# Altium footprint library KhPcbLib1.PcbLib: 10 footprints
Each footprint in its own frame and in the unit in brackets; x right, y up, seen from the top. Pads: shape width x height; smd on the part's side, far side on the other; paste and mask are expansions set on the pad; w line width, h text height; cw(c..) or ccw(c..) is an arc to the next point about the centre after c.
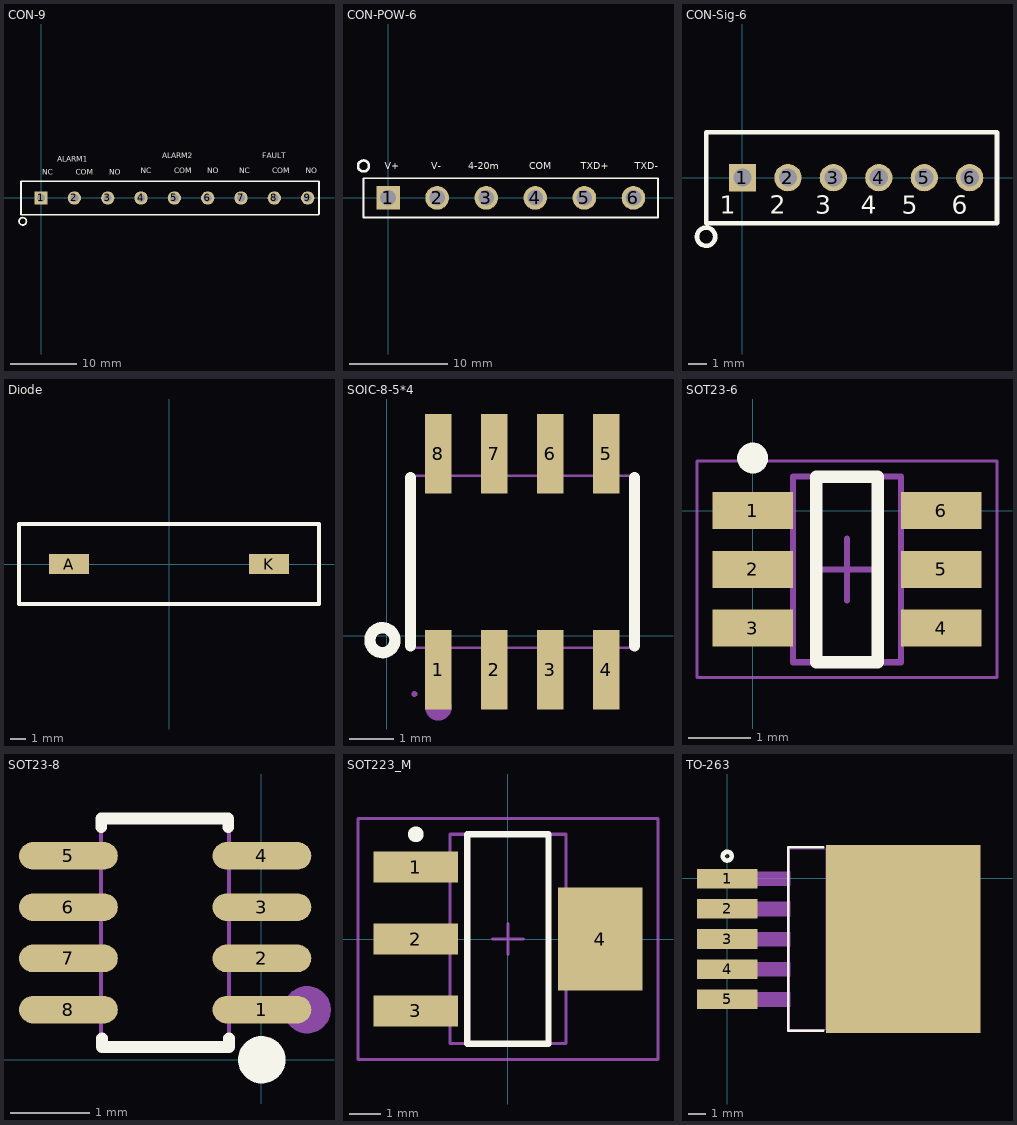
[diagram p0: the footprints below, top view; thin cyan lines are the x and y axes]

## CON-9 [mm]
pads (9):
  rect 2x2 hole 1.2: 1(0,0)
  round 2 hole 1.2: 2(5,0) 3(10,0) 4(15,0) 5(20,0) 6(25,0) 7(30,0) 8(35,0) 9(40,0)
Top Overlay:
  circle w0.254: c-2.75,-3.5 r0.559
  lines w0.254: -3,0 -3,2.5 41.7,2.5 41.7,-2.4 41.6,-2.5 -3,-2.5 -3,0.4
  text "FAULT" at 33.2,5.95 h0.8
  text "ALARM2" at 18.2,5.95 h0.8
  text "ALARM1" at 2.45,5.45 h0.8
  text "NC" at 0.2,3.45 h0.8
  text "COM" at 5.2,3.45 h0.8
  text "NO" at 10.2,3.45 h0.8
  text "NC" at 14.95,3.7 h0.8
  text "COM" at 19.95,3.7 h0.8
  text "NO" at 24.95,3.7 h0.8
  text "NC" at 29.7,3.7 h0.8
  text "COM" at 34.7,3.7 h0.8
  text "NO" at 39.7,3.7 h0.8

## CON-POW-6 [mm]
pads (6):
  rect 2.4x2.4 hole 1.6: 1(0,0)
  round 2.4 hole 1.6: 2(5,0) 3(10,0) 4(15,0) 5(20,0) 6(25,0)
Top Overlay:
  circle w0.254: c-2.5,3.25 r0.559
  lines w0.2: -2.5,-2 -2.5,2 27.5,2 27.5,-2 -2.5,-2
  text "TXD-" at 25.154,2.904 h0.7
  text "COM" at 14.404,2.904 h0.7
  text "TXD+" at 19.654,2.904 h0.7
  text "4-20m" at 8.154,2.904 h0.7
  text "V-" at 4.404,2.904 h0.7
  text "V+" at -0.346,2.904 h0.7
Mechanical 13:
  lines w0.1: -2.5,-2 -2.5,2 27.5,2 27.5,-2

## CON-Sig-6 [mm]
pads (7):
  rect 1.5x1.5 hole 1: 1(0,0)
  round 1.5 hole 1: 2(2.5,0) 2(2.5,0) 3(5,0) 4(7.5,0) 5(10,0) 6(12.5,0)
Top Overlay:
  circle w0.254: c-2,-3.25 r0.5
  lines w0.254: -2,-2.5 -2,2.5 14,2.5 14,-2.5 -2,-2.5
  text "6" at 11.504,-1.996 h1
  text "5" at 8.754,-1.996 h1
  text "4" at 6.504,-1.996 h1
  text "3" at 4.004,-1.996 h1
  text "2" at 1.504,-1.996 h1
  text "1" at -1.246,-1.996 h1

## Diode [mm]
pads (2):
  rect 2.54x1.27 smd: A(-6.35,0) K(6.35,0)
Top Overlay:
  lines w0.254: -9.525,-2.54 9.525,-2.54 9.525,2.54 -9.525,2.54 -9.525,0 -9.525,-2.54

## SMD-0805 [mm]

## SOIC-8-5*4 [mm] "SOIC, 8-Leads, Body 4.90x3.85mm, Pitch 1.27mm, IPC Medium Density"
height 2.65
pads (8):
  rect 0.6x1.8 smd paste+0 mask+0.05: 1(1.173,-0.776) 2(2.443,-0.776) 3(3.713,-0.776) 4(4.983,-0.776) 5(4.983,4.124) 6(3.713,4.124) 7(2.443,4.124) 8(1.173,4.124)
Top Overlay:
  circle w0.254: c-0.097,-0.104 r0.284
  lines w0.254: 0.538,-0.231 0.538,3.579 ; 5.618,-0.231 5.618,3.579
Mechanical 2:
  circle w0.3: c1.173,-1.628 r0.15
Mechanical 6:
  lines w0.051: 0.628,-0.276 5.528,-0.276 5.528,3.624 0.628,3.624 0.628,-0.276
Mechanical 7:
  region: 0.964,3.614 0.964,3.846 1.382,3.846 1.382,3.614
  region: 4.774,3.614 4.774,3.846 5.192,3.846 5.192,3.614
  region: 3.504,3.614 3.504,3.846 3.922,3.846 3.922,3.614
  region: 2.234,3.614 2.234,3.846 2.652,3.846 2.652,3.614
  region: 4.774,-0.498 4.774,-0.266 5.192,-0.266 5.192,-0.498
  region: 3.504,-0.498 3.504,-0.266 3.922,-0.266 3.922,-0.498
  region: 2.234,-0.498 2.234,-0.266 2.652,-0.266 2.652,-0.498
  region: 0.964,-0.498 0.964,-0.266 1.382,-0.266 1.382,-0.498
Mechanical 8:
  region: 0.688,-1.326 0.688,-1.351 0.653,-1.386 0.603,-1.386 0.568,-1.351 0.568,-1.326 0.568,-1.301 0.603,-1.266 0.653,-1.266 0.688,-1.301
Mechanical 9:
  region: 0.964,3.836 0.964,4.674 1.382,4.674 1.382,3.836
  region: 4.774,3.836 4.774,4.674 5.192,4.674 5.192,3.836
  region: 3.504,3.836 3.504,4.674 3.922,4.674 3.922,3.836
  region: 2.234,3.836 2.234,4.674 2.652,4.674 2.652,3.836
  region: 4.774,-1.326 4.774,-0.488 5.192,-0.488 5.192,-1.326
  region: 3.504,-1.326 3.504,-0.488 3.922,-0.488 3.922,-1.326
  region: 2.234,-1.326 2.234,-0.488 2.652,-0.488 2.652,-1.326
  region: 0.964,-1.326 0.964,-0.488 1.382,-0.488 1.382,-1.326
3D body "SOIC-8.step": height 1.75, standoff 0, extent 0.649,-1.349 5.549,4.651

## SOT23-6 [mm] "SOT23, 6-Leads, Body 2.64x3.50mm, Pitch 0.95mm, IPC Medium Density"
height 1.1
pads (6):
  rect 1.3x0.6 smd: 1(0,0) 2(0,-0.95) 3(0,-1.9) 4(3.05,-1.9) 5(3.05,-0.95) 6(3.05,0)
Top Overlay:
  circle w0.25: c0,0.85 r0.125
  lines w0.2: 1.025,-2.45 2.025,-2.45 2.025,0.55 1.025,0.55 1.025,-2.45
Mechanical 13:
  lines w0.1: 0.65,-2.45 0.65,0.55 2.4,0.55 2.4,-2.45 0.65,-2.45
Mechanical 15:
  lines w0.05: -0.9,-2.7 -0.9,0.8 3.95,0.8 3.95,-2.7 -0.9,-2.7
  lines w0.1: 1.025,-0.95 2.025,-0.95 ; 1.525,-1.45 1.525,-0.45
3D body: height 1.1, standoff 0.05, extent 0.65,-2.45 2.4,0.55

## SOT23-8 [mm]
pads (8):
  oval 1.252x0.35 smd: 1(0.005,0.632) 2(0.005,1.282) 3(0.005,1.932) 4(0.005,2.582) 5(-2.447,2.582) 6(-2.447,1.932) 7(-2.447,1.282) 8(-2.447,0.632)
Top Overlay:
  circle w0.3: c0.005,-0.002 r0.15
  lines w0.15: -2.031,2.943 -2.031,3.057 -0.421,3.057 -0.421,2.943 ; -2.021,0.271 -2.021,0.157 -0.411,0.157 -0.411,0.271
Mechanical 2:
  circle w0.3: c0.579,0.632 r0.15
Mechanical 6:
  lines w0.051: -2.034,0.157 -0.409,0.157 -0.409,3.057 -2.034,3.057 -2.034,0.157
Mechanical 7:
  region: -2.181,2.432 -2.181,2.732 -2.024,2.732 -2.024,2.432
  region: -2.181,1.782 -2.181,2.082 -2.024,2.082 -2.024,1.782
  region: -2.181,1.132 -2.181,1.432 -2.024,1.432 -2.024,1.132
  region: -2.181,0.482 -2.181,0.782 -2.024,0.782 -2.024,0.482
  region: -0.419,2.432 -0.419,2.732 -0.261,2.732 -0.261,2.432
  region: -0.419,1.782 -0.419,2.082 -0.261,2.082 -0.261,1.782
  region: -0.419,1.132 -0.419,1.432 -0.261,1.432 -0.261,1.132
  region: -0.419,0.482 -0.419,0.782 -0.261,0.782 -0.261,0.482
Mechanical 8:
  region: 0.239,0.157 0.239,0.132 0.204,0.097 0.154,0.097 0.119,0.132 0.119,0.157 0.119,0.182 0.154,0.217 0.204,0.217 0.239,0.182
Mechanical 9:
  region: -2.621,2.432 -2.621,2.732 -2.171,2.732 -2.171,2.432
  region: -2.621,1.782 -2.621,2.082 -2.171,2.082 -2.171,1.782
  region: -2.621,1.132 -2.621,1.432 -2.171,1.432 -2.171,1.132
  region: -2.621,0.482 -2.621,0.782 -2.171,0.782 -2.171,0.482
  region: -0.271,2.432 -0.271,2.732 0.179,2.732 0.179,2.432
  region: -0.271,1.782 -0.271,2.082 0.179,2.082 0.179,1.782
  region: -0.271,1.132 -0.271,1.432 0.179,1.432 0.179,1.132
  region: -0.271,0.482 -0.271,0.782 0.179,0.782 0.179,0.482
3D body "AD5245_SOT23-8.step": height 1.2, standoff 0, extent -2.619,0.148 0.181,3.048

## SOT223_M [mm] "SOT223, 4-Leads, Body 6.5x3.5mm, Pitch 2.3mm, Lead Span 7mm, IPC Low Density"
height 1.7
pads (4):
  rect 2.7x1 smd: 1(-2.95,2.3) 2(-2.95,0) 3(-2.95,-2.3)
  rect 2.7x3.3 smd: 4(2.95,0)
Top Overlay:
  circle w0.25: c-2.95,3.35 r0.125
  lines w0.2: -1.3,-3.35 -1.3,3.35 1.3,3.35 1.3,-3.35 -1.3,-3.35
Mechanical 13:
  lines w0.1: -1.85,-3.35 -1.85,3.35 1.85,3.35 1.85,-3.35 -1.85,-3.35
Mechanical 15:
  lines w0.1: -0.5,0 0.5,0 ; 0,-0.5 0,0.5 ; -4.8,-3.85 -4.8,3.85 4.8,3.85 4.8,-3.85 -4.8,-3.85
3D body "User Library-SOT-223-2.STEP": height 1.85, standoff -0.05, extent -3.42,-3.379 3.784,3.321

## TO-263 [mm]
pads (6):
  rect 3.4x1.1 smd: 1(-0.002,-0.019) 2(-0.002,-1.719) 3(-0.002,-3.419) 4(-0.002,-5.119) 5(-0.002,-6.819)
  rect 8.705x10.587 smd: ""(9.904,-3.419)
Top Overlay:
  circle w0.254: c0,1.25 r0.25
  lines w0.152: 5.399,-8.585 3.435,-8.585 3.435,1.748 5.399,1.748
Mechanical 2:
  circle w0.42: c-1.145,0.01 r0.21
Mechanical 6:
  lines w0.051: 3.512,-8.509 12.252,-8.509 12.252,1.671 3.512,1.671 3.512,-8.509
Mechanical 7:
  region: 0.855,-0.429 0.855,0.371 3.555,0.371 3.555,-0.429
  region: 0.855,-2.129 0.855,-1.329 3.555,-1.329 3.555,-2.129
  region: 0.855,-3.829 0.855,-3.029 3.555,-3.029 3.555,-3.829
  region: 0.855,-5.529 0.855,-4.729 3.555,-4.729 3.555,-5.529
  region: 0.855,-7.229 0.855,-6.429 3.555,-6.429 3.555,-7.229
Mechanical 9:
  region: 5.552,-8.509 5.552,1.671 12.504,1.671 13.522,0.653 13.522,-7.491 12.504,-8.509
  region: -1.145,-7.229 -1.145,-6.419 0.895,-6.419 0.895,-7.229
  region: -1.145,-5.524 -1.145,-4.714 0.895,-4.714 0.895,-5.524
  region: -1.145,-3.824 -1.145,-3.014 0.895,-3.014 0.895,-3.824
  region: -1.145,-2.124 -1.145,-1.314 0.895,-1.314 0.895,-2.124
  region: -1.145,-0.424 -1.145,0.386 0.895,0.386 0.895,-0.424